# Altium schematic symbol library bridge_1ph.SchLib: 1 symbol
Pins are listed as number, name and electrical type; pins without a type are passive.

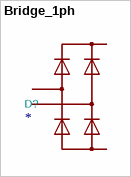
[diagram p0: symbol Bridge_1ph]

## Bridge_1ph
designator D?
ki_keywords: Bridge 1 phase; ki_description: Bridge_1_phase; Datasheet: https://diotec.com/de/produktliste/B1.html
footprint KBPCxxxxFP
pins: 1 +, 2 Input ~, 3 -, 4 Input ~